# Altium integrated library UCC27211D.IntLib: 1 symbol
Pins are listed as number, name and electrical type; pins without a type are passive.

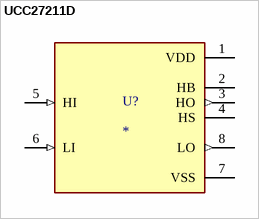
[diagram p0: symbol UCC27211D]

## UCC27211D
designator U?
4-A, 120-V half bridge gate driver with 8-V UVLO and TTL inputs; MF: Texas Instruments; MP: UCC27211D; SnapEDA_Link: https://www.snapeda.com/parts/UCC27211D/Texas+Instruments/view-part/?ref=snap; Package: SOIC-8 Texas Instruments; Value: *; Check_prices: https://www.snapeda.com/parts/UCC27211D/Texas+Instruments/view-part/?ref=eda
footprint SOIC127P599X175-8N
pins: 1 VDD (power), 2 HB, 3 HO (out), 4 HS, 5 HI (in), 6 LI (in), 7 VSS (power), 8 LO (out)